# Altium footprint library WR-FPC_0.50mm.PcbLib: 147 footprints (part 4 of 10)
Each footprint in its own frame and in the unit in brackets; x right, y up, seen from the top. Pads: shape width x height; smd on the part's side, far side on the other; paste and mask are expansions set on the pad; w line width, h text height; cw(c..) or ccw(c..) is an arc to the next point about the centre after c.
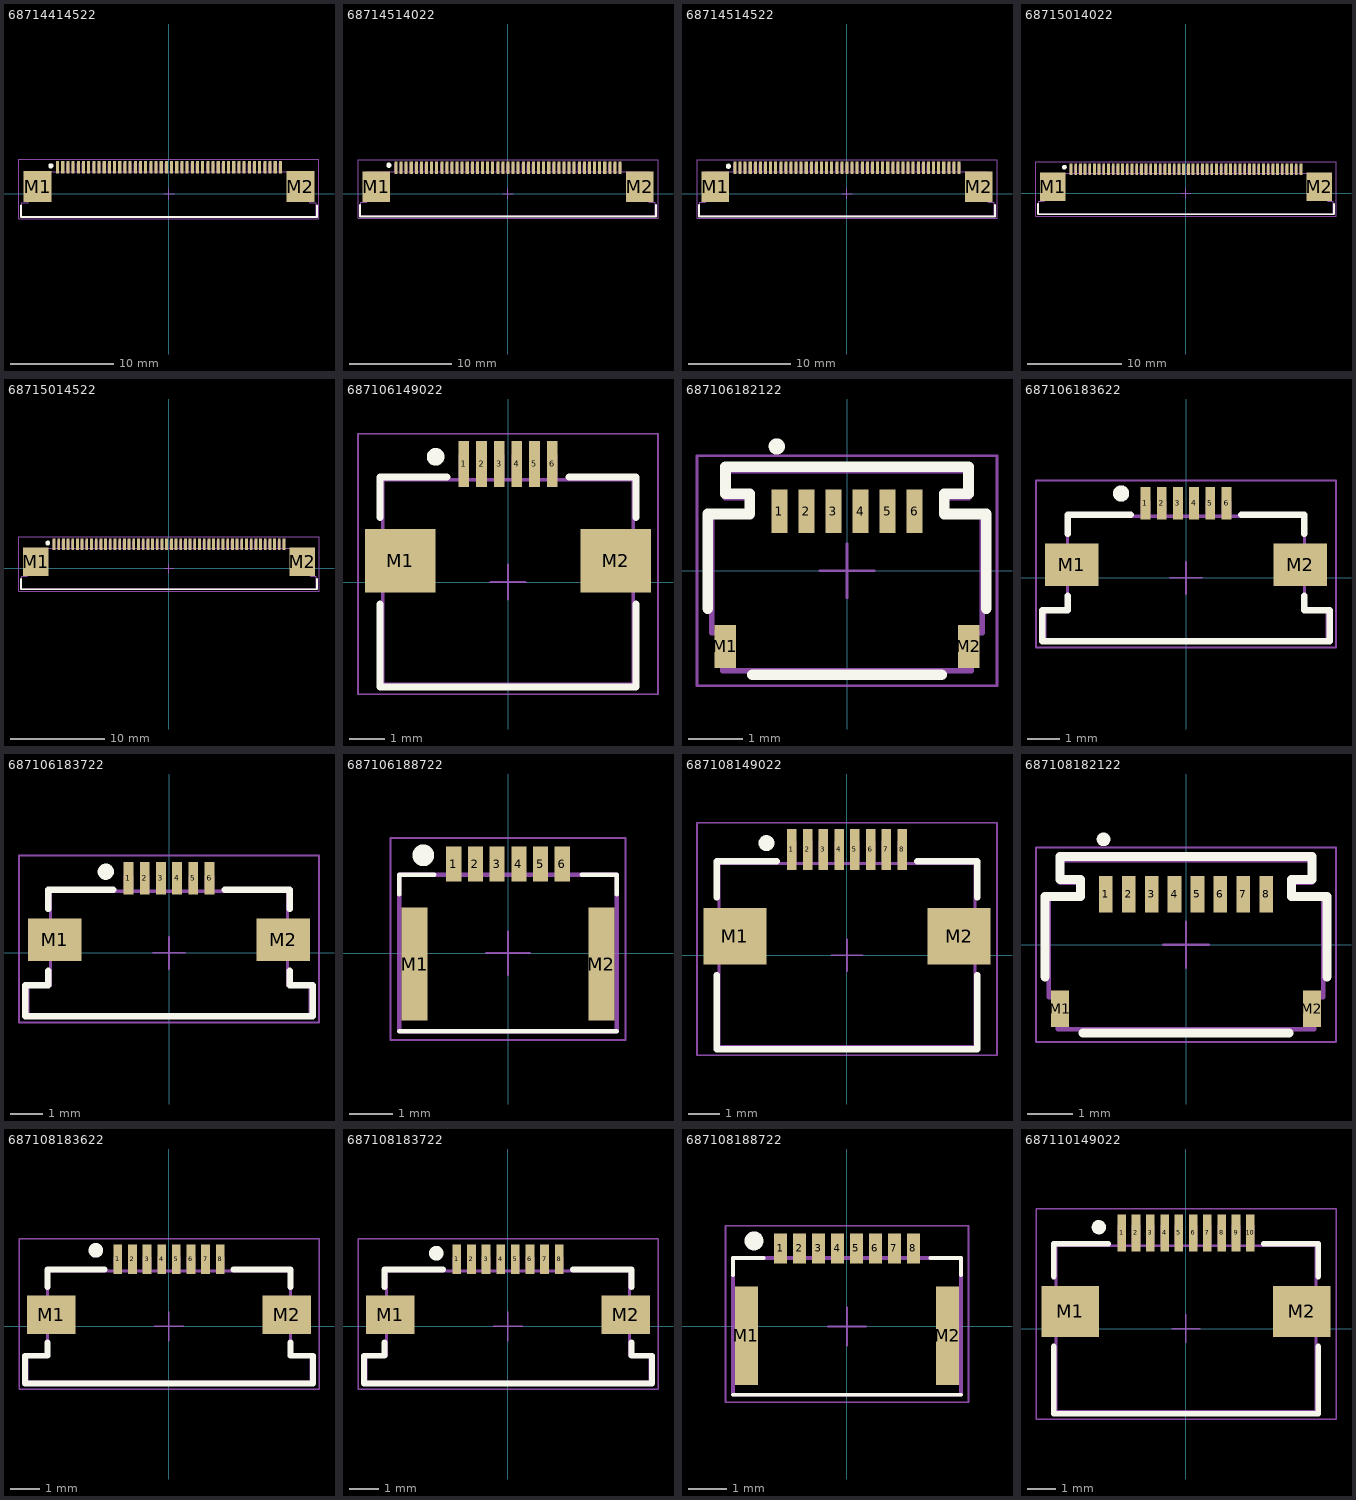
[diagram p3: the footprints below, top view; thin cyan lines are the x and y axes]

## 68714414522 [mm] "ZIF Connectors, Horizontal, Bottom Contact, pitch 0.5mm, 44p"
height 2.25
pads (46):
  rect 0.3x1.2 smd: 1(-10.75,2.56) 2(-10.25,2.56) 3(-9.75,2.56) 4(-9.25,2.56) 5(-8.75,2.56) 6(-8.25,2.56) 7(-7.75,2.56) 8(-7.25,2.56) 9(-6.75,2.56) 10(-6.25,2.56) 11(-5.75,2.56) 12(-5.25,2.56) 13(-4.75,2.56) 14(-4.25,2.56) 15(-3.75,2.56) 16(-3.25,2.56) 17(-2.75,2.56) 18(-2.25,2.56) 19(-1.75,2.56) 20(-1.25,2.56) 21(-0.75,2.56) 22(-0.25,2.56) 23(0.25,2.56) 24(0.75,2.56) 25(1.25,2.56) 26(1.75,2.56) 27(2.25,2.56) 28(2.75,2.56) 29(3.25,2.56) 30(3.75,2.56) 31(4.25,2.56) 32(4.75,2.56) 33(5.25,2.56) 34(5.75,2.56) 35(6.25,2.56) 36(6.75,2.56) 37(7.25,2.56) 38(7.75,2.56) 39(8.25,2.56) 40(8.75,2.56) 41(9.25,2.56) 42(9.75,2.56) 43(10.25,2.56) 44(10.75,2.56)
  rect 2.7x3 smd: M1(-12.68,0.7) M2(12.68,0.7)
Top Overlay:
  circle w0.25: c-11.4,2.7 r0.125
  lines w0.2: -14.275,-1.125 -14.275,-2.225 14.275,-2.225 14.275,-1.125
Top Designator:
  text ".Designator" at -7.498,-0.5 h1.5
Top Component Outline:
  lines w0.1: -10.85,2.15 -10.85,2.95 -10.65,2.95 -10.65,2.15 ; -10.35,2.15 -10.35,2.95 -10.15,2.95 -10.15,2.15 ; -9.85,2.15 -9.85,2.95 -9.65,2.95 -9.65,2.15 ; -9.35,2.15 -9.35,2.95 -9.15,2.95 -9.15,2.15 ; -8.85,2.15 -8.85,2.95 -8.65,2.95 -8.65,2.15 ; -8.35,2.15 -8.35,2.95 -8.15,2.95 -8.15,2.15 ; -7.85,2.15 -7.85,2.95 -7.65,2.95 -7.65,2.15 ; -7.35,2.15 -7.35,2.95 -7.15,2.95 -7.15,2.15 ; -6.85,2.15 -6.85,2.95 -6.65,2.95 -6.65,2.15 ; -6.35,2.15 -6.35,2.95 -6.15,2.95 -6.15,2.15 ; -5.85,2.15 -5.85,2.95 -5.65,2.95 -5.65,2.15 ; -5.35,2.15 -5.35,2.95 -5.15,2.95 -5.15,2.15 ; -4.85,2.15 -4.85,2.95 -4.65,2.95 -4.65,2.15 ; -4.35,2.15 -4.35,2.95 -4.15,2.95 -4.15,2.15 ; -3.85,2.15 -3.85,2.95 -3.65,2.95 -3.65,2.15 ; -3.35,2.15 -3.35,2.95 -3.15,2.95 -3.15,2.15 ; -2.85,2.15 -2.85,2.95 -2.65,2.95 -2.65,2.15 ; -2.35,2.15 -2.35,2.95 -2.15,2.95 -2.15,2.15 ; -1.85,2.15 -1.85,2.95 -1.65,2.95 -1.65,2.15 ; -1.35,2.15 -1.35,2.95 -1.15,2.95 -1.15,2.15 ; -0.85,2.15 -0.85,2.95 -0.65,2.95 -0.65,2.15 ; -0.35,2.15 -0.35,2.95 -0.15,2.95 -0.15,2.15 ; 0.15,2.15 0.15,2.95 0.35,2.95 0.35,2.15 ; 0.65,2.15 0.65,2.95 0.85,2.95 0.85,2.15 ; 1.15,2.15 1.15,2.95 1.35,2.95 1.35,2.15 ; 1.65,2.15 1.65,2.95 1.85,2.95 1.85,2.15 ; 2.15,2.15 2.15,2.95 2.35,2.95 2.35,2.15 ; 2.65,2.15 2.65,2.95 2.85,2.95 2.85,2.15 ; 3.15,2.15 3.15,2.95 3.35,2.95 3.35,2.15 ; 3.65,2.15 3.65,2.95 3.85,2.95 3.85,2.15 ; 4.15,2.15 4.15,2.95 4.35,2.95 4.35,2.15 ; 4.65,2.15 4.65,2.95 4.85,2.95 4.85,2.15 ; 5.15,2.15 5.15,2.95 5.35,2.95 5.35,2.15 ; 5.65,2.15 5.65,2.95 5.85,2.95 5.85,2.15 ; 6.15,2.15 6.15,2.95 6.35,2.95 6.35,2.15 ; 6.65,2.15 6.65,2.95 6.85,2.95 6.85,2.15 ; 7.15,2.15 7.15,2.95 7.35,2.95 7.35,2.15 ; 7.65,2.15 7.65,2.95 7.85,2.95 7.85,2.15 ; 8.15,2.15 8.15,2.95 8.35,2.95 8.35,2.15 ; 8.65,2.15 8.65,2.95 8.85,2.95 8.85,2.15 ; 9.15,2.15 9.15,2.95 9.35,2.95 9.35,2.15 ; 9.65,2.15 9.65,2.95 9.85,2.95 9.85,2.15 ; 10.15,2.15 10.15,2.95 10.35,2.95 10.35,2.15 ; 10.65,2.15 10.65,2.95 10.85,2.95 10.85,2.15 ; -14.2,-2.15 14.2,-2.15 14.2,-0.85 13.6,-0.85 13.6,2.15 -13.6,2.15 -13.6,-0.85 -14.2,-0.85 -14.2,-2.15
Top 3D Body:
  lines w0.1: -10.85,2.15 -10.85,2.95 -10.65,2.95 -10.65,2.15 ; -10.35,2.15 -10.35,2.95 -10.15,2.95 -10.15,2.15 ; -9.85,2.15 -9.85,2.95 -9.65,2.95 -9.65,2.15 ; -9.35,2.15 -9.35,2.95 -9.15,2.95 -9.15,2.15 ; -8.85,2.15 -8.85,2.95 -8.65,2.95 -8.65,2.15 ; -8.35,2.15 -8.35,2.95 -8.15,2.95 -8.15,2.15 ; -7.85,2.15 -7.85,2.95 -7.65,2.95 -7.65,2.15 ; -7.35,2.15 -7.35,2.95 -7.15,2.95 -7.15,2.15 ; -6.85,2.15 -6.85,2.95 -6.65,2.95 -6.65,2.15 ; -6.35,2.15 -6.35,2.95 -6.15,2.95 -6.15,2.15 ; -5.85,2.15 -5.85,2.95 -5.65,2.95 -5.65,2.15 ; -5.35,2.15 -5.35,2.95 -5.15,2.95 -5.15,2.15 ; -4.85,2.15 -4.85,2.95 -4.65,2.95 -4.65,2.15 ; -4.35,2.15 -4.35,2.95 -4.15,2.95 -4.15,2.15 ; -3.85,2.15 -3.85,2.95 -3.65,2.95 -3.65,2.15 ; -3.35,2.15 -3.35,2.95 -3.15,2.95 -3.15,2.15 ; -2.85,2.15 -2.85,2.95 -2.65,2.95 -2.65,2.15 ; -2.35,2.15 -2.35,2.95 -2.15,2.95 -2.15,2.15 ; -1.85,2.15 -1.85,2.95 -1.65,2.95 -1.65,2.15 ; -1.35,2.15 -1.35,2.95 -1.15,2.95 -1.15,2.15 ; -0.85,2.15 -0.85,2.95 -0.65,2.95 -0.65,2.15 ; -0.35,2.15 -0.35,2.95 -0.15,2.95 -0.15,2.15 ; 0.15,2.15 0.15,2.95 0.35,2.95 0.35,2.15 ; 0.65,2.15 0.65,2.95 0.85,2.95 0.85,2.15 ; 1.15,2.15 1.15,2.95 1.35,2.95 1.35,2.15 ; 1.65,2.15 1.65,2.95 1.85,2.95 1.85,2.15 ; 2.15,2.15 2.15,2.95 2.35,2.95 2.35,2.15 ; 2.65,2.15 2.65,2.95 2.85,2.95 2.85,2.15 ; 3.15,2.15 3.15,2.95 3.35,2.95 3.35,2.15 ; 3.65,2.15 3.65,2.95 3.85,2.95 3.85,2.15 ; 4.15,2.15 4.15,2.95 4.35,2.95 4.35,2.15 ; 4.65,2.15 4.65,2.95 4.85,2.95 4.85,2.15 ; 5.15,2.15 5.15,2.95 5.35,2.95 5.35,2.15 ; 5.65,2.15 5.65,2.95 5.85,2.95 5.85,2.15 ; 6.15,2.15 6.15,2.95 6.35,2.95 6.35,2.15 ; 6.65,2.15 6.65,2.95 6.85,2.95 6.85,2.15 ; 7.15,2.15 7.15,2.95 7.35,2.95 7.35,2.15 ; 7.65,2.15 7.65,2.95 7.85,2.95 7.85,2.15 ; 8.15,2.15 8.15,2.95 8.35,2.95 8.35,2.15 ; 8.65,2.15 8.65,2.95 8.85,2.95 8.85,2.15 ; 9.15,2.15 9.15,2.95 9.35,2.95 9.35,2.15 ; 9.65,2.15 9.65,2.95 9.85,2.95 9.85,2.15 ; 10.15,2.15 10.15,2.95 10.35,2.95 10.35,2.15 ; 10.65,2.15 10.65,2.95 10.85,2.95 10.85,2.15 ; -14.2,-2.15 -14.2,-0.85 -13.6,-0.85 -13.6,2.15 13.6,2.15 13.6,-0.85 14.2,-0.85 14.2,-2.15 -14.2,-2.15
Top Courtyard:
  lines w0.05: -0.5,0 0.5,0 ; 0,-0.5 0,0.5 ; -14.475,-2.425 -14.475,3.36 14.475,3.36 14.475,-2.425 -14.475,-2.425
3D body "68714414522.stp": height 2.1, standoff 0, extent -14.2,-2.15 14.2,2.95

## 68714514022 [mm] "ZIF Connectors, Horizontal, Top Contact, pitch 0.5mm, 45p"
height 2.25
pads (47):
  rect 0.3x1.2 smd: 1(-11,2.56) 2(-10.5,2.56) 3(-10,2.56) 4(-9.5,2.56) 5(-9,2.56) 6(-8.5,2.56) 7(-8,2.56) 8(-7.5,2.56) 9(-7,2.56) 10(-6.5,2.56) 11(-6,2.56) 12(-5.5,2.56) 13(-5,2.56) 14(-4.5,2.56) 15(-4,2.56) 16(-3.5,2.56) 17(-3,2.56) 18(-2.5,2.56) 19(-2,2.56) 20(-1.5,2.56) 21(-1,2.56) 22(-0.5,2.56) 23(0,2.56) 24(0.5,2.56) 25(1,2.56) 26(1.5,2.56) 27(2,2.56) 28(2.5,2.56) 29(3,2.56) 30(3.5,2.56) 31(4,2.56) 32(4.5,2.56) 33(5,2.56) 34(5.5,2.56) 35(6,2.56) 36(6.5,2.56) 37(7,2.56) 38(7.5,2.56) 39(8,2.56) 40(8.5,2.56) 41(9,2.56) 42(9.5,2.56) 43(10,2.56) 44(10.5,2.56) 45(11,2.56)
  rect 2.7x3 smd: M1(-12.93,0.7) M2(12.93,0.7)
Top Overlay:
  circle w0.25: c-11.7,2.8 r0.125
  lines w0.2: -14.525,-1.1 -14.525,-2.225 14.525,-2.225 14.525,-1.1
Top Designator:
  text ".Designator" at -7.498,-0.5 h1.5
Top Component Outline:
  lines w0.1: -11.1,2.15 -11.1,2.95 -10.9,2.95 -10.9,2.15 ; -10.6,2.15 -10.6,2.95 -10.4,2.95 -10.4,2.15 ; -10.1,2.15 -10.1,2.95 -9.9,2.95 -9.9,2.15 ; -9.6,2.15 -9.6,2.95 -9.4,2.95 -9.4,2.15 ; -9.1,2.15 -9.1,2.95 -8.9,2.95 -8.9,2.15 ; -8.6,2.15 -8.6,2.95 -8.4,2.95 -8.4,2.15 ; -8.1,2.15 -8.1,2.95 -7.9,2.95 -7.9,2.15 ; -7.6,2.15 -7.6,2.95 -7.4,2.95 -7.4,2.15 ; -7.1,2.15 -7.1,2.95 -6.9,2.95 -6.9,2.15 ; -6.6,2.15 -6.6,2.95 -6.4,2.95 -6.4,2.15 ; -6.1,2.15 -6.1,2.95 -5.9,2.95 -5.9,2.15 ; -5.6,2.15 -5.6,2.95 -5.4,2.95 -5.4,2.15 ; -5.1,2.15 -5.1,2.95 -4.9,2.95 -4.9,2.15 ; -4.6,2.15 -4.6,2.95 -4.4,2.95 -4.4,2.15 ; -4.1,2.15 -4.1,2.95 -3.9,2.95 -3.9,2.15 ; -3.6,2.15 -3.6,2.95 -3.4,2.95 -3.4,2.15 ; -3.1,2.15 -3.1,2.95 -2.9,2.95 -2.9,2.15 ; -2.6,2.15 -2.6,2.95 -2.4,2.95 -2.4,2.15 ; -2.1,2.15 -2.1,2.95 -1.9,2.95 -1.9,2.15 ; -1.6,2.15 -1.6,2.95 -1.4,2.95 -1.4,2.15 ; -1.1,2.15 -1.1,2.95 -0.9,2.95 -0.9,2.15 ; -0.6,2.15 -0.6,2.95 -0.4,2.95 -0.4,2.15 ; -0.1,2.15 -0.1,2.95 0.1,2.95 0.1,2.15 ; 0.4,2.15 0.4,2.95 0.6,2.95 0.6,2.15 ; 0.9,2.15 0.9,2.95 1.1,2.95 1.1,2.15 ; 1.4,2.15 1.4,2.95 1.6,2.95 1.6,2.15 ; 1.9,2.15 1.9,2.95 2.1,2.95 2.1,2.15 ; 2.4,2.15 2.4,2.95 2.6,2.95 2.6,2.15 ; 2.9,2.15 2.9,2.95 3.1,2.95 3.1,2.15 ; 3.4,2.15 3.4,2.95 3.6,2.95 3.6,2.15 ; 3.9,2.15 3.9,2.95 4.1,2.95 4.1,2.15 ; 4.4,2.15 4.4,2.95 4.6,2.95 4.6,2.15 ; 4.9,2.15 4.9,2.95 5.1,2.95 5.1,2.15 ; 5.4,2.15 5.4,2.95 5.6,2.95 5.6,2.15 ; 5.9,2.15 5.9,2.95 6.1,2.95 6.1,2.15 ; 6.4,2.15 6.4,2.95 6.6,2.95 6.6,2.15 ; 6.9,2.15 6.9,2.95 7.1,2.95 7.1,2.15 ; 7.4,2.15 7.4,2.95 7.6,2.95 7.6,2.15 ; 7.9,2.15 7.9,2.95 8.1,2.95 8.1,2.15 ; 8.4,2.15 8.4,2.95 8.6,2.95 8.6,2.15 ; 8.9,2.15 8.9,2.95 9.1,2.95 9.1,2.15 ; 9.4,2.15 9.4,2.95 9.6,2.95 9.6,2.15 ; 9.9,2.15 9.9,2.95 10.1,2.95 10.1,2.15 ; 10.4,2.15 10.4,2.95 10.6,2.95 10.6,2.15 ; 10.9,2.15 10.9,2.95 11.1,2.95 11.1,2.15 ; -14.45,-2.15 -14.45,-0.85 -13.85,-0.85 -13.85,2.15 13.85,2.15 13.85,-0.85 14.45,-0.85 14.45,-2.15 -14.45,-2.15
Top 3D Body:
  lines w0.1: -11.1,2.15 -11.1,2.95 -10.9,2.95 -10.9,2.15 ; -10.6,2.15 -10.6,2.95 -10.4,2.95 -10.4,2.15 ; -10.1,2.15 -10.1,2.95 -9.9,2.95 -9.9,2.15 ; -9.6,2.15 -9.6,2.95 -9.4,2.95 -9.4,2.15 ; -9.1,2.15 -9.1,2.95 -8.9,2.95 -8.9,2.15 ; -8.6,2.15 -8.6,2.95 -8.4,2.95 -8.4,2.15 ; -8.1,2.15 -8.1,2.95 -7.9,2.95 -7.9,2.15 ; -7.6,2.15 -7.6,2.95 -7.4,2.95 -7.4,2.15 ; -7.1,2.15 -7.1,2.95 -6.9,2.95 -6.9,2.15 ; -6.6,2.15 -6.6,2.95 -6.4,2.95 -6.4,2.15 ; -6.1,2.15 -6.1,2.95 -5.9,2.95 -5.9,2.15 ; -5.6,2.15 -5.6,2.95 -5.4,2.95 -5.4,2.15 ; -5.1,2.15 -5.1,2.95 -4.9,2.95 -4.9,2.15 ; -4.6,2.15 -4.6,2.95 -4.4,2.95 -4.4,2.15 ; -4.1,2.15 -4.1,2.95 -3.9,2.95 -3.9,2.15 ; -3.6,2.15 -3.6,2.95 -3.4,2.95 -3.4,2.15 ; -3.1,2.15 -3.1,2.95 -2.9,2.95 -2.9,2.15 ; -2.6,2.15 -2.6,2.95 -2.4,2.95 -2.4,2.15 ; -2.1,2.15 -2.1,2.95 -1.9,2.95 -1.9,2.15 ; -1.6,2.15 -1.6,2.95 -1.4,2.95 -1.4,2.15 ; -1.1,2.15 -1.1,2.95 -0.9,2.95 -0.9,2.15 ; -0.6,2.15 -0.6,2.95 -0.4,2.95 -0.4,2.15 ; -0.1,2.15 -0.1,2.95 0.1,2.95 0.1,2.15 ; 0.4,2.15 0.4,2.95 0.6,2.95 0.6,2.15 ; 0.9,2.15 0.9,2.95 1.1,2.95 1.1,2.15 ; 1.4,2.15 1.4,2.95 1.6,2.95 1.6,2.15 ; 1.9,2.15 1.9,2.95 2.1,2.95 2.1,2.15 ; 2.4,2.15 2.4,2.95 2.6,2.95 2.6,2.15 ; 2.9,2.15 2.9,2.95 3.1,2.95 3.1,2.15 ; 3.4,2.15 3.4,2.95 3.6,2.95 3.6,2.15 ; 3.9,2.15 3.9,2.95 4.1,2.95 4.1,2.15 ; 4.4,2.15 4.4,2.95 4.6,2.95 4.6,2.15 ; 4.9,2.15 4.9,2.95 5.1,2.95 5.1,2.15 ; 5.4,2.15 5.4,2.95 5.6,2.95 5.6,2.15 ; 5.9,2.15 5.9,2.95 6.1,2.95 6.1,2.15 ; 6.4,2.15 6.4,2.95 6.6,2.95 6.6,2.15 ; 6.9,2.15 6.9,2.95 7.1,2.95 7.1,2.15 ; 7.4,2.15 7.4,2.95 7.6,2.95 7.6,2.15 ; 7.9,2.15 7.9,2.95 8.1,2.95 8.1,2.15 ; 8.4,2.15 8.4,2.95 8.6,2.95 8.6,2.15 ; 8.9,2.15 8.9,2.95 9.1,2.95 9.1,2.15 ; 9.4,2.15 9.4,2.95 9.6,2.95 9.6,2.15 ; 9.9,2.15 9.9,2.95 10.1,2.95 10.1,2.15 ; 10.4,2.15 10.4,2.95 10.6,2.95 10.6,2.15 ; 10.9,2.15 10.9,2.95 11.1,2.95 11.1,2.15 ; -14.45,-2.15 14.45,-2.15 14.45,-0.85 13.85,-0.85 13.85,2.15 -13.85,2.15 -13.85,-0.85 -14.45,-0.85 -14.45,-2.15
Top Courtyard:
  lines w0.05: -0.5,0 0.5,0 ; 0,-0.5 0,0.5 ; -14.725,-2.425 -14.725,3.36 14.725,3.36 14.725,-2.425 -14.725,-2.425
3D body "68714514022.stp": height 2.1, standoff 0, extent -14.45,-2.15 14.45,2.95

## 68714514522 [mm] "ZIF Connectors, Horizontal, Bottom Contact, pitch 0.5mm, 45p"
height 2.25
pads (47):
  rect 0.3x1.2 smd: 1(-11,2.56) 2(-10.5,2.56) 3(-10,2.56) 4(-9.5,2.56) 5(-9,2.56) 6(-8.5,2.56) 7(-8,2.56) 8(-7.5,2.56) 9(-7,2.56) 10(-6.5,2.56) 11(-6,2.56) 12(-5.5,2.56) 13(-5,2.56) 14(-4.5,2.56) 15(-4,2.56) 16(-3.5,2.56) 17(-3,2.56) 18(-2.5,2.56) 19(-2,2.56) 20(-1.5,2.56) 21(-1,2.56) 22(-0.5,2.56) 23(0,2.56) 24(0.5,2.56) 25(1,2.56) 26(1.5,2.56) 27(2,2.56) 28(2.5,2.56) 29(3,2.56) 30(3.5,2.56) 31(4,2.56) 32(4.5,2.56) 33(5,2.56) 34(5.5,2.56) 35(6,2.56) 36(6.5,2.56) 37(7,2.56) 38(7.5,2.56) 39(8,2.56) 40(8.5,2.56) 41(9,2.56) 42(9.5,2.56) 43(10,2.56) 44(10.5,2.56) 45(11,2.56)
  rect 2.7x3 smd: M1(-12.93,0.7) M2(12.93,0.7)
Top Overlay:
  circle w0.25: c-11.65,2.7 r0.125
  lines w0.2: -14.525,-1.125 -14.525,-2.225 14.525,-2.225 14.525,-1.125
Top Designator:
  text ".Designator" at -7.498,-0.5 h1.5
Top Component Outline:
  lines w0.1: -11.1,2.15 -11.1,2.95 -10.9,2.95 -10.9,2.15 ; -10.6,2.15 -10.6,2.95 -10.4,2.95 -10.4,2.15 ; -10.1,2.15 -10.1,2.95 -9.9,2.95 -9.9,2.15 ; -9.6,2.15 -9.6,2.95 -9.4,2.95 -9.4,2.15 ; -9.1,2.15 -9.1,2.95 -8.9,2.95 -8.9,2.15 ; -8.6,2.15 -8.6,2.95 -8.4,2.95 -8.4,2.15 ; -8.1,2.15 -8.1,2.95 -7.9,2.95 -7.9,2.15 ; -7.6,2.15 -7.6,2.95 -7.4,2.95 -7.4,2.15 ; -7.1,2.15 -7.1,2.95 -6.9,2.95 -6.9,2.15 ; -6.6,2.15 -6.6,2.95 -6.4,2.95 -6.4,2.15 ; -6.1,2.15 -6.1,2.95 -5.9,2.95 -5.9,2.15 ; -5.6,2.15 -5.6,2.95 -5.4,2.95 -5.4,2.15 ; -5.1,2.15 -5.1,2.95 -4.9,2.95 -4.9,2.15 ; -4.6,2.15 -4.6,2.95 -4.4,2.95 -4.4,2.15 ; -4.1,2.15 -4.1,2.95 -3.9,2.95 -3.9,2.15 ; -3.6,2.15 -3.6,2.95 -3.4,2.95 -3.4,2.15 ; -3.1,2.15 -3.1,2.95 -2.9,2.95 -2.9,2.15 ; -2.6,2.15 -2.6,2.95 -2.4,2.95 -2.4,2.15 ; -2.1,2.15 -2.1,2.95 -1.9,2.95 -1.9,2.15 ; -1.6,2.15 -1.6,2.95 -1.4,2.95 -1.4,2.15 ; -1.1,2.15 -1.1,2.95 -0.9,2.95 -0.9,2.15 ; -0.6,2.15 -0.6,2.95 -0.4,2.95 -0.4,2.15 ; -0.1,2.15 -0.1,2.95 0.1,2.95 0.1,2.15 ; 0.4,2.15 0.4,2.95 0.6,2.95 0.6,2.15 ; 0.9,2.15 0.9,2.95 1.1,2.95 1.1,2.15 ; 1.4,2.15 1.4,2.95 1.6,2.95 1.6,2.15 ; 1.9,2.15 1.9,2.95 2.1,2.95 2.1,2.15 ; 2.4,2.15 2.4,2.95 2.6,2.95 2.6,2.15 ; 2.9,2.15 2.9,2.95 3.1,2.95 3.1,2.15 ; 3.4,2.15 3.4,2.95 3.6,2.95 3.6,2.15 ; 3.9,2.15 3.9,2.95 4.1,2.95 4.1,2.15 ; 4.4,2.15 4.4,2.95 4.6,2.95 4.6,2.15 ; 4.9,2.15 4.9,2.95 5.1,2.95 5.1,2.15 ; 5.4,2.15 5.4,2.95 5.6,2.95 5.6,2.15 ; 5.9,2.15 5.9,2.95 6.1,2.95 6.1,2.15 ; 6.4,2.15 6.4,2.95 6.6,2.95 6.6,2.15 ; 6.9,2.15 6.9,2.95 7.1,2.95 7.1,2.15 ; 7.4,2.15 7.4,2.95 7.6,2.95 7.6,2.15 ; 7.9,2.15 7.9,2.95 8.1,2.95 8.1,2.15 ; 8.4,2.15 8.4,2.95 8.6,2.95 8.6,2.15 ; 8.9,2.15 8.9,2.95 9.1,2.95 9.1,2.15 ; 9.4,2.15 9.4,2.95 9.6,2.95 9.6,2.15 ; 9.9,2.15 9.9,2.95 10.1,2.95 10.1,2.15 ; 10.4,2.15 10.4,2.95 10.6,2.95 10.6,2.15 ; 10.9,2.15 10.9,2.95 11.1,2.95 11.1,2.15 ; -14.45,-2.15 -14.45,-0.85 -13.85,-0.85 -13.85,2.15 13.85,2.15 13.85,-0.85 14.45,-0.85 14.45,-2.15 -14.45,-2.15
Top 3D Body:
  lines w0.1: -11.1,2.15 -11.1,2.95 -10.9,2.95 -10.9,2.15 ; -10.6,2.15 -10.6,2.95 -10.4,2.95 -10.4,2.15 ; -10.1,2.15 -10.1,2.95 -9.9,2.95 -9.9,2.15 ; -9.6,2.15 -9.6,2.95 -9.4,2.95 -9.4,2.15 ; -9.1,2.15 -9.1,2.95 -8.9,2.95 -8.9,2.15 ; -8.6,2.15 -8.6,2.95 -8.4,2.95 -8.4,2.15 ; -8.1,2.15 -8.1,2.95 -7.9,2.95 -7.9,2.15 ; -7.6,2.15 -7.6,2.95 -7.4,2.95 -7.4,2.15 ; -7.1,2.15 -7.1,2.95 -6.9,2.95 -6.9,2.15 ; -6.6,2.15 -6.6,2.95 -6.4,2.95 -6.4,2.15 ; -6.1,2.15 -6.1,2.95 -5.9,2.95 -5.9,2.15 ; -5.6,2.15 -5.6,2.95 -5.4,2.95 -5.4,2.15 ; -5.1,2.15 -5.1,2.95 -4.9,2.95 -4.9,2.15 ; -4.6,2.15 -4.6,2.95 -4.4,2.95 -4.4,2.15 ; -4.1,2.15 -4.1,2.95 -3.9,2.95 -3.9,2.15 ; -3.6,2.15 -3.6,2.95 -3.4,2.95 -3.4,2.15 ; -3.1,2.15 -3.1,2.95 -2.9,2.95 -2.9,2.15 ; -2.6,2.15 -2.6,2.95 -2.4,2.95 -2.4,2.15 ; -2.1,2.15 -2.1,2.95 -1.9,2.95 -1.9,2.15 ; -1.6,2.15 -1.6,2.95 -1.4,2.95 -1.4,2.15 ; -1.1,2.15 -1.1,2.95 -0.9,2.95 -0.9,2.15 ; -0.6,2.15 -0.6,2.95 -0.4,2.95 -0.4,2.15 ; -0.1,2.15 -0.1,2.95 0.1,2.95 0.1,2.15 ; 0.4,2.15 0.4,2.95 0.6,2.95 0.6,2.15 ; 0.9,2.15 0.9,2.95 1.1,2.95 1.1,2.15 ; 1.4,2.15 1.4,2.95 1.6,2.95 1.6,2.15 ; 1.9,2.15 1.9,2.95 2.1,2.95 2.1,2.15 ; 2.4,2.15 2.4,2.95 2.6,2.95 2.6,2.15 ; 2.9,2.15 2.9,2.95 3.1,2.95 3.1,2.15 ; 3.4,2.15 3.4,2.95 3.6,2.95 3.6,2.15 ; 3.9,2.15 3.9,2.95 4.1,2.95 4.1,2.15 ; 4.4,2.15 4.4,2.95 4.6,2.95 4.6,2.15 ; 4.9,2.15 4.9,2.95 5.1,2.95 5.1,2.15 ; 5.4,2.15 5.4,2.95 5.6,2.95 5.6,2.15 ; 5.9,2.15 5.9,2.95 6.1,2.95 6.1,2.15 ; 6.4,2.15 6.4,2.95 6.6,2.95 6.6,2.15 ; 6.9,2.15 6.9,2.95 7.1,2.95 7.1,2.15 ; 7.4,2.15 7.4,2.95 7.6,2.95 7.6,2.15 ; 7.9,2.15 7.9,2.95 8.1,2.95 8.1,2.15 ; 8.4,2.15 8.4,2.95 8.6,2.95 8.6,2.15 ; 8.9,2.15 8.9,2.95 9.1,2.95 9.1,2.15 ; 9.4,2.15 9.4,2.95 9.6,2.95 9.6,2.15 ; 9.9,2.15 9.9,2.95 10.1,2.95 10.1,2.15 ; 10.4,2.15 10.4,2.95 10.6,2.95 10.6,2.15 ; 10.9,2.15 10.9,2.95 11.1,2.95 11.1,2.15 ; -14.45,-2.15 14.45,-2.15 14.45,-0.85 13.85,-0.85 13.85,2.15 -13.85,2.15 -13.85,-0.85 -14.45,-0.85 -14.45,-2.15
Top Courtyard:
  lines w0.05: -0.5,0 0.5,0 ; 0,-0.5 0,0.5 ; -14.725,-2.425 14.725,-2.425 14.725,3.36 -14.725,3.36 -14.725,-2.425
3D body "68714514522.stp": height 2.1, standoff 0, extent -14.45,-2.15 14.45,2.95

## 68715014022 [mm] "ZIF Connectors, Horizontal, Top Contact, pitch 0.5mm, 50p"
height 2.25
pads (52):
  rect 0.3x1.2 smd: 1(-12.25,2.56) 2(-11.75,2.56) 3(-11.25,2.56) 4(-10.75,2.56) 5(-10.25,2.56) 6(-9.75,2.56) 7(-9.25,2.56) 8(-8.75,2.56) 9(-8.25,2.56) 10(-7.75,2.56) 11(-7.25,2.56) 12(-6.75,2.56) 13(-6.25,2.56) 14(-5.75,2.56) 15(-5.25,2.56) 16(-4.75,2.56) 17(-4.25,2.56) 18(-3.75,2.56) 19(-3.25,2.56) 20(-2.75,2.56) 21(-2.25,2.56) 22(-1.75,2.56) 23(-1.25,2.56) 24(-0.75,2.56) 25(-0.25,2.56) 26(0.25,2.56) 27(0.75,2.56) 28(1.25,2.56) 29(1.75,2.56) 30(2.25,2.56) 31(2.75,2.56) 32(3.25,2.56) 33(3.75,2.56) 34(4.25,2.56) 35(4.75,2.56) 36(5.25,2.56) 37(5.75,2.56) 38(6.25,2.56) 39(6.75,2.56) 40(7.25,2.56) 41(7.75,2.56) 42(8.25,2.56) 43(8.75,2.56) 44(9.25,2.56) 45(9.75,2.56) 46(10.25,2.56) 47(10.75,2.56) 48(11.25,2.56) 49(11.75,2.56) 50(12.25,2.56)
  rect 2.7x3 smd: M1(-14.18,0.7) M2(14.18,0.7)
Top Overlay:
  circle w0.25: c-12.95,2.8 r0.125
  lines w0.2: -15.775,-1.1 -15.775,-2.225 15.775,-2.225 15.775,-1.1
Top Designator:
  text ".Designator" at -7.498,-0.5 h1.5
Top Component Outline:
  drawing of 158 lines, arcs and shapes, not listed
Top 3D Body:
  drawing of 158 lines, arcs and shapes, not listed
Top Courtyard:
  lines w0.05: -0.5,0 0.5,0 ; 0,-0.5 0,0.5 ; -15.975,-2.425 15.975,-2.425 15.975,3.36 -15.975,3.36 -15.975,-2.425
3D body "68715014022.stp": height 2.1, standoff 0, extent -15.7,-2.15 15.7,2.95

## 68715014522 [mm] "ZIF Connectors, Horizontal, Bottom Contact, pitch 0.5mm, 50p"
height 2.25
pads (52):
  rect 0.3x1.2 smd: 1(-12.25,2.56) 2(-11.75,2.56) 3(-11.25,2.56) 4(-10.75,2.56) 5(-10.25,2.56) 6(-9.75,2.56) 7(-9.25,2.56) 8(-8.75,2.56) 9(-8.25,2.56) 10(-7.75,2.56) 11(-7.25,2.56) 12(-6.75,2.56) 13(-6.25,2.56) 14(-5.75,2.56) 15(-5.25,2.56) 16(-4.75,2.56) 17(-4.25,2.56) 18(-3.75,2.56) 19(-3.25,2.56) 20(-2.75,2.56) 21(-2.25,2.56) 22(-1.75,2.56) 23(-1.25,2.56) 24(-0.75,2.56) 25(-0.25,2.56) 26(0.25,2.56) 27(0.75,2.56) 28(1.25,2.56) 29(1.75,2.56) 30(2.25,2.56) 31(2.75,2.56) 32(3.25,2.56) 33(3.75,2.56) 34(4.25,2.56) 35(4.75,2.56) 36(5.25,2.56) 37(5.75,2.56) 38(6.25,2.56) 39(6.75,2.56) 40(7.25,2.56) 41(7.75,2.56) 42(8.25,2.56) 43(8.75,2.56) 44(9.25,2.56) 45(9.75,2.56) 46(10.25,2.56) 47(10.75,2.56) 48(11.25,2.56) 49(11.75,2.56) 50(12.25,2.56)
  rect 2.7x3 smd: M1(-14.18,0.7) M2(14.18,0.7)
Top Overlay:
  circle w0.25: c-12.9,2.7 r0.125
  lines w0.2: -15.775,-1.125 -15.775,-2.225 15.775,-2.225 15.775,-1.125
Top Designator:
  text ".Designator" at -7.498,-0.5 h1.5
Top Component Outline:
  drawing of 158 lines, arcs and shapes, not listed
Top 3D Body:
  drawing of 158 lines, arcs and shapes, not listed
Top Courtyard:
  lines w0.05: -0.5,0 0.5,0 ; 0,-0.5 0,0.5 ; -15.975,-2.425 -15.975,3.36 15.975,3.36 15.975,-2.425 -15.975,-2.425
3D body "68715014522.stp": height 2.1, standoff 0, extent -15.7,-2.15 15.7,2.95

## 687106149022 [mm] "0.50mm SMT ZIF Horizontal Hinge Type Bottom Contact, 6p"
height 2.3
pads (8):
  rect 0.3x1.3 smd: 1(-1.25,3.35) 2(-0.75,3.35) 3(-0.25,3.35) 4(0.25,3.35) 5(0.75,3.35) 6(1.25,3.35)
  rect 2x1.8 smd: M1(-3.05,0.6) M2(3.05,0.6)
Top Overlay:
  circle w0.25: c-2.05,3.55 r0.125
  lines w0.2: -3.625,-0.625 -3.625,-2.975 3.625,-2.975 3.625,-0.625 ; -3.625,1.825 -3.625,2.975 -1.725,2.975 ; 1.725,2.975 3.625,2.975 3.625,1.825
Top Designator:
  text ".Designator" at -7.498,-0.5 h1.5
Top Component Outline:
  lines w0.1: -1.35,2.9 -1.35,3.6 -1.15,3.6 -1.15,2.9 ; -0.85,2.9 -0.85,3.6 -0.65,3.6 -0.65,2.9 ; -0.35,2.9 -0.35,3.6 -0.15,3.6 -0.15,2.9 ; 0.15,2.9 0.15,3.6 0.35,3.6 0.35,2.9 ; 0.65,2.9 0.65,3.6 0.85,3.6 0.85,2.9 ; 1.15,2.9 1.15,3.6 1.35,3.6 1.35,2.9 ; -3.55,-2.9 -3.55,2.9 3.55,2.9 3.55,-2.9 -3.55,-2.9
Top 3D Body:
  lines w0.1: -1.35,2.9 -1.35,3.6 -1.15,3.6 -1.15,2.9 ; -0.85,2.9 -0.85,3.6 -0.65,3.6 -0.65,2.9 ; -0.35,2.9 -0.35,3.6 -0.15,3.6 -0.15,2.9 ; 0.15,2.9 0.15,3.6 0.35,3.6 0.35,2.9 ; 0.65,2.9 0.65,3.6 0.85,3.6 0.85,2.9 ; 1.15,2.9 1.15,3.6 1.35,3.6 1.35,2.9 ; -3.55,-2.9 3.55,-2.9 3.55,2.9 -3.55,2.9 -3.55,-2.9
Top Courtyard:
  lines w0.05: -0.5,0 0.5,0 ; 0,-0.5 0,0.5 ; -4.25,-3.175 -4.25,4.2 4.25,4.2 4.25,-3.175 -4.25,-3.175
3D body "687106149022.stp": height 2.25, standoff 0, extent -3.55,-2.9 3.55,3.6

## 687106182122 [mm] "ZIF Connectors, Horizontal, Dual Contact Back Locking, pitch 0.5mm, 6p"
height 1.06
pads (8):
  rect 0.3x0.8 smd: 1(-1.25,1.1) 2(-0.75,1.1) 3(-0.25,1.1) 4(0.25,1.1) 5(0.75,1.1) 6(1.25,1.1)
  rect 0.4x0.8 smd: M1(-2.25,-1.4) M2(2.25,-1.4)
Top Overlay:
  circle w0.15: c-1.3,2.3 r0.075
  lines w0.2: -2.575,-0.7 -2.575,1.05 -1.8,1.05 -1.8,1.425 -2.25,1.425 -2.25,1.925 2.25,1.925 2.25,1.425 1.8,1.425 1.8,1.05 2.575,1.05 2.575,-0.7 ; -1.75,-1.925 1.75,-1.925
Top Designator:
  text ".Designator" at -5.998,-0.4 h1.2
Top Component Outline:
  lines w0.1: -2.5,-1.15 -2.3,-1.15 -2.3,-1.85 2.3,-1.85 2.3,-1.15 2.5,-1.15 2.5,1.05 1.8,1.05 1.8,1.35 2.25,1.35 2.25,1.85 -2.25,1.85 -2.25,1.35 -1.8,1.35 -1.8,1.05 -2.5,1.05 -2.5,-1.15
Top 3D Body:
  lines w0.1: -2.5,-1.15 -2.5,1.05 -1.8,1.05 -1.8,1.35 -2.25,1.35 -2.25,1.85 2.25,1.85 2.25,1.35 1.8,1.35 1.8,1.05 2.5,1.05 2.5,-1.15 2.3,-1.15 2.3,-1.85 -2.3,-1.85 -2.3,-1.15 -2.5,-1.15
Top Courtyard:
  lines w0.05: -0.5,0 0.5,0 ; 0,-0.5 0,0.5 ; -2.775,-2.125 2.775,-2.125 2.775,2.125 -2.775,2.125 -2.775,-2.125
3D body "687106182122.stp": height 0.98, standoff -0.01, extent -2.5,-1.85 2.5,1.85

## 687106183622 [mm] "ZIF Connectors, Horizontal, Top Contact Low Profile, pitch 0.5mm, 6p"
height 1.3
pads (8):
  rect 0.3x1 smd: 1(-1.25,2.3) 2(-0.75,2.3) 3(-0.25,2.3) 4(0.25,2.3) 5(0.75,2.3) 6(1.25,2.3)
  rect 1.65x1.3 smd: M1(-3.525,0.4) M2(3.525,0.4)
Top Overlay:
  circle w0.25: c-2,2.6 r0.125
  lines w0.2: -3.65,-0.55 -3.65,-1 -4.425,-1 -4.425,-1.95 4.425,-1.95 4.425,-1 3.65,-1 3.65,-0.55 ; -3.65,1.35 -3.65,1.95 -1.7,1.95 ; 1.7,1.95 3.65,1.95 3.65,1.35
Top Designator:
  text ".Designator" at -7.498,-0.5 h1.5
Top Component Outline:
  lines w0.1: -1.35,1.9 -1.35,2.35 -1.15,2.35 -1.15,1.9 ; -0.85,1.9 -0.85,2.35 -0.65,2.35 -0.65,1.9 ; -0.35,1.9 -0.35,2.35 -0.15,2.35 -0.15,1.9 ; 0.15,1.9 0.15,2.35 0.35,2.35 0.35,1.9 ; 0.65,1.9 0.65,2.35 0.85,2.35 0.85,1.9 ; 1.15,1.9 1.15,2.35 1.35,2.35 1.35,1.9 ; -4.35,-1.9 -4.35,-1 -3.65,-1 -3.65,1.9 3.65,1.9 3.65,-1 4.35,-1 4.35,-1.9 -4.35,-1.9
Top 3D Body:
  lines w0.1: -1.35,1.9 -1.35,2.35 -1.15,2.35 -1.15,1.9 ; -0.85,1.9 -0.85,2.35 -0.65,2.35 -0.65,1.9 ; -0.35,1.9 -0.35,2.35 -0.15,2.35 -0.15,1.9 ; 0.15,1.9 0.15,2.35 0.35,2.35 0.35,1.9 ; 0.65,1.9 0.65,2.35 0.85,2.35 0.85,1.9 ; 1.15,1.9 1.15,2.35 1.35,2.35 1.35,1.9 ; -4.35,-1.9 4.35,-1.9 4.35,-1 3.65,-1 3.65,1.9 -3.65,1.9 -3.65,-1 -4.35,-1 -4.35,-1.9
Top Courtyard:
  lines w0.05: -0.5,0 0.5,0 ; 0,-0.5 0,0.5 ; -4.625,-2.15 -4.625,3 4.625,3 4.625,-2.15 -4.625,-2.15
3D body "687106183622.stp": height 1.28, standoff -0.01, extent -4.35,-1.9 4.35,2.35

## 687106183722 [mm] "ZIF Connectors, Horizontal, Bottom Contact Low Profile, pitch 0.5mm, 6p"
height 1.3
pads (8):
  rect 0.3x1 smd: 1(-1.25,2.3) 2(-0.75,2.3) 3(-0.25,2.3) 4(0.25,2.3) 5(0.75,2.3) 6(1.25,2.3)
  rect 1.65x1.3 smd: M1(-3.525,0.4) M2(3.525,0.4)
Top Overlay:
  circle w0.25: c-1.95,2.5 r0.125
  lines w0.2: -3.725,-0.55 -3.725,-1 -4.425,-1 -4.425,-1.95 4.425,-1.95 4.425,-1 3.725,-1 3.725,-0.55 ; -3.725,1.35 -3.725,1.95 -1.725,1.95 ; 1.725,1.95 3.725,1.95 3.725,1.35
Top Designator:
  text ".Designator" at -7.498,-0.5 h1.5
Top Component Outline:
  lines w0.1: -1.35,1.9 -1.35,2.35 -1.15,2.35 -1.15,1.9 ; -0.85,1.9 -0.85,2.35 -0.65,2.35 -0.65,1.9 ; -0.35,1.9 -0.35,2.35 -0.15,2.35 -0.15,1.9 ; 0.15,1.9 0.15,2.35 0.35,2.35 0.35,1.9 ; 0.65,1.9 0.65,2.35 0.85,2.35 0.85,1.9 ; 1.15,1.9 1.15,2.35 1.35,2.35 1.35,1.9 ; -4.35,-1.9 4.35,-1.9 4.35,-1 3.65,-1 3.65,1.9 -3.65,1.9 -3.65,-1 -4.35,-1 -4.35,-1.9
Top 3D Body:
  lines w0.1: -1.35,1.9 -1.35,2.35 -1.15,2.35 -1.15,1.9 ; -0.85,1.9 -0.85,2.35 -0.65,2.35 -0.65,1.9 ; -0.35,1.9 -0.35,2.35 -0.15,2.35 -0.15,1.9 ; 0.15,1.9 0.15,2.35 0.35,2.35 0.35,1.9 ; 0.65,1.9 0.65,2.35 0.85,2.35 0.85,1.9 ; 1.15,1.9 1.15,2.35 1.35,2.35 1.35,1.9 ; -4.35,-1.9 -4.35,-1 -3.65,-1 -3.65,1.9 3.65,1.9 3.65,-1 4.35,-1 4.35,-1.9 -4.35,-1.9
Top Courtyard:
  lines w0.05: -0.5,0 0.5,0 ; 0,-0.5 0,0.5 ; -4.625,-2.15 4.625,-2.15 4.625,3 -4.625,3 -4.625,-2.15
3D body "687106183722.stp": height 1.28, standoff -0.01, extent -4.35,-1.9 4.35,2.35

## 687106188722 [mm] "0.5 mm LIF Horizontal FFC Connector, 6pins"
height 1.2
pads (8):
  rect 0.35x0.8 smd: 1(-1.25,2.05) 2(-0.75,2.05) 3(-0.25,2.05) 4(0.25,2.05) 5(0.75,2.05) 6(1.25,2.05)
  rect 0.6x2.6 smd: M1(-2.15,-0.25) M2(2.15,-0.25)
Top Overlay:
  circle w0.25: c-1.95,2.25 r0.125
  lines w0.1: -2.5,-1.8 2.5,-1.8 ; -2.5,1.35 -2.5,1.8 -1.7,1.8 ; 1.7,1.8 2.5,1.8 2.5,1.35
Top Designator:
  text ".Designator" at -7.498,-0.5 h1.5
Top Component Outline:
  lines w0.1: -1.35,1.8 -1.35,2.3 -1.15,2.3 -1.15,1.8 ; -0.85,1.8 -0.85,2.3 -0.65,2.3 -0.65,1.8 ; -0.35,1.8 -0.35,2.3 -0.15,2.3 -0.15,1.8 ; 0.15,1.8 0.15,2.3 0.35,2.3 0.35,1.8 ; 0.65,1.8 0.65,2.3 0.85,2.3 0.85,1.8 ; 1.15,1.8 1.15,2.3 1.35,2.3 1.35,1.8 ; -2.5,-1.8 2.5,-1.8 2.5,1.8 -2.5,1.8 -2.5,-1.8
Top 3D Body:
  lines w0.1: -1.35,1.8 -1.35,2.3 -1.15,2.3 -1.15,1.8 ; -0.85,1.8 -0.85,2.3 -0.65,2.3 -0.65,1.8 ; -0.35,1.8 -0.35,2.3 -0.15,2.3 -0.15,1.8 ; 0.15,1.8 0.15,2.3 0.35,2.3 0.35,1.8 ; 0.65,1.8 0.65,2.3 0.85,2.3 0.85,1.8 ; 1.15,1.8 1.15,2.3 1.35,2.3 1.35,1.8 ; -2.5,-1.8 -2.5,1.8 2.5,1.8 2.5,-1.8 -2.5,-1.8
Top Courtyard:
  lines w0.05: -0.5,0 0.5,0 ; 0,-0.5 0,0.5 ; -2.7,-2 2.7,-2 2.7,2.65 -2.7,2.65 -2.7,-2
3D body "687106188722.stp": height 1.2, standoff 0, extent -2.5,-1.8 2.5,2.3

## 687108149022 [mm] "0.50mm SMT ZIF Horizontal Hinge Type Bottom Contact, 8p"
height 2.3
pads (10):
  rect 0.3x1.3 smd: 1(-1.75,3.35) 2(-1.25,3.35) 3(-0.75,3.35) 4(-0.25,3.35) 5(0.25,3.35) 6(0.75,3.35) 7(1.25,3.35) 8(1.75,3.35)
  rect 2x1.8 smd: M1(-3.55,0.6) M2(3.55,0.6)
Top Overlay:
  circle w0.25: c-2.55,3.55 r0.125
  lines w0.2: -4.125,-0.625 -4.125,-2.975 4.125,-2.975 4.125,-0.625 ; -4.125,1.825 -4.125,2.975 -2.225,2.975 ; 2.225,2.975 4.125,2.975 4.125,1.825
Top Designator:
  text ".Designator" at -7.498,-0.5 h1.5
Top Component Outline:
  lines w0.1: -1.85,2.9 -1.85,3.6 -1.65,3.6 -1.65,2.9 ; -1.35,2.9 -1.35,3.6 -1.15,3.6 -1.15,2.9 ; -0.85,2.9 -0.85,3.6 -0.65,3.6 -0.65,2.9 ; -0.35,2.9 -0.35,3.6 -0.15,3.6 -0.15,2.9 ; 0.15,2.9 0.15,3.6 0.35,3.6 0.35,2.9 ; 0.65,2.9 0.65,3.6 0.85,3.6 0.85,2.9 ; 1.15,2.9 1.15,3.6 1.35,3.6 1.35,2.9 ; 1.65,2.9 1.65,3.6 1.85,3.6 1.85,2.9 ; -4.05,-2.9 4.05,-2.9 4.05,2.9 -4.05,2.9 -4.05,-2.9
Top 3D Body:
  lines w0.1: -1.85,2.9 -1.85,3.6 -1.65,3.6 -1.65,2.9 ; -1.35,2.9 -1.35,3.6 -1.15,3.6 -1.15,2.9 ; -0.85,2.9 -0.85,3.6 -0.65,3.6 -0.65,2.9 ; -0.35,2.9 -0.35,3.6 -0.15,3.6 -0.15,2.9 ; 0.15,2.9 0.15,3.6 0.35,3.6 0.35,2.9 ; 0.65,2.9 0.65,3.6 0.85,3.6 0.85,2.9 ; 1.15,2.9 1.15,3.6 1.35,3.6 1.35,2.9 ; 1.65,2.9 1.65,3.6 1.85,3.6 1.85,2.9 ; -4.05,-2.9 -4.05,2.9 4.05,2.9 4.05,-2.9 -4.05,-2.9
Top Courtyard:
  lines w0.05: -0.5,0 0.5,0 ; 0,-0.5 0,0.5 ; -4.75,-3.175 4.75,-3.175 4.75,4.2 -4.75,4.2 -4.75,-3.175
3D body "687108149022.stp": height 2.25, standoff 0, extent -4.05,-2.9 4.05,3.6

## 687108182122 [mm] "ZIF Connectors, Horizontal, Dual Contact Back Locking, pitch 0.5mm, 8p"
height 1.06
pads (10):
  rect 0.3x0.8 smd: 1(-1.75,1.1) 2(-1.25,1.1) 3(-0.75,1.1) 4(-0.25,1.1) 5(0.25,1.1) 6(0.75,1.1) 7(1.25,1.1) 8(1.75,1.1)
  rect 0.4x0.8 smd: M1(-2.75,-1.4) M2(2.75,-1.4)
Top Overlay:
  circle w0.15: c-1.8,2.3 r0.075
  lines w0.2: -3.075,-0.7 -3.075,1.05 -2.3,1.05 -2.3,1.425 -2.75,1.425 -2.75,1.925 2.75,1.925 2.75,1.425 2.3,1.425 2.3,1.05 3.075,1.05 3.075,-0.7 ; -2.25,-1.925 2.25,-1.925
Top Designator:
  text ".Designator" at -7.498,-0.5 h1.5
Top Component Outline:
  lines w0.1: -3,-1.15 -2.8,-1.15 -2.8,-1.85 2.8,-1.85 2.8,-1.15 3,-1.15 3,1.05 2.3,1.05 2.3,1.35 2.75,1.35 2.75,1.85 -2.75,1.85 -2.75,1.35 -2.3,1.35 -2.3,1.05 -3,1.05 -3,-1.15
Top 3D Body:
  lines w0.1: -3,-1.15 -3,1.05 -2.3,1.05 -2.3,1.35 -2.75,1.35 -2.75,1.85 2.75,1.85 2.75,1.35 2.3,1.35 2.3,1.05 3,1.05 3,-1.15 2.8,-1.15 2.8,-1.85 -2.8,-1.85 -2.8,-1.15 -3,-1.15
Top Courtyard:
  lines w0.05: -0.5,0 0.5,0 ; 0,-0.5 0,0.5 ; -3.275,-2.125 3.275,-2.125 3.275,2.125 -3.275,2.125 -3.275,-2.125
3D body "687108182122.stp": height 0.98, standoff -0.01, extent -3,-1.85 3,1.85

## 687108183622 [mm] "ZIF Connectors, Horizontal, Top Contact Low Profile, pitch 0.5mm, 8p"
height 1.3
pads (10):
  rect 0.3x1 smd: 1(-1.75,2.3) 2(-1.25,2.3) 3(-0.75,2.3) 4(-0.25,2.3) 5(0.25,2.3) 6(0.75,2.3) 7(1.25,2.3) 8(1.75,2.3)
  rect 1.65x1.3 smd: M1(-4.025,0.4) M2(4.025,0.4)
Top Overlay:
  circle w0.25: c-2.5,2.6 r0.125
  lines w0.2: -4.15,-0.55 -4.15,-1 -4.925,-1 -4.925,-1.95 4.925,-1.95 4.925,-1 4.15,-1 4.15,-0.55 ; -4.15,1.35 -4.15,1.95 -2.2,1.95 ; 2.2,1.95 4.15,1.95 4.15,1.35
Top Designator:
  text ".Designator" at -7.498,-0.5 h1.5
Top Component Outline:
  lines w0.1: -1.85,1.9 -1.85,2.35 -1.65,2.35 -1.65,1.9 ; -1.35,1.9 -1.35,2.35 -1.15,2.35 -1.15,1.9 ; -0.85,1.9 -0.85,2.35 -0.65,2.35 -0.65,1.9 ; -0.35,1.9 -0.35,2.35 -0.15,2.35 -0.15,1.9 ; 0.15,1.9 0.15,2.35 0.35,2.35 0.35,1.9 ; 0.65,1.9 0.65,2.35 0.85,2.35 0.85,1.9 ; 1.15,1.9 1.15,2.35 1.35,2.35 1.35,1.9 ; 1.65,1.9 1.65,2.35 1.85,2.35 1.85,1.9 ; -4.85,-1.9 4.85,-1.9 4.85,-1 4.15,-1 4.15,1.9 -4.15,1.9 -4.15,-1 -4.85,-1 -4.85,-1.9
Top 3D Body:
  lines w0.1: -1.85,1.9 -1.85,2.35 -1.65,2.35 -1.65,1.9 ; -1.35,1.9 -1.35,2.35 -1.15,2.35 -1.15,1.9 ; -0.85,1.9 -0.85,2.35 -0.65,2.35 -0.65,1.9 ; -0.35,1.9 -0.35,2.35 -0.15,2.35 -0.15,1.9 ; 0.15,1.9 0.15,2.35 0.35,2.35 0.35,1.9 ; 0.65,1.9 0.65,2.35 0.85,2.35 0.85,1.9 ; 1.15,1.9 1.15,2.35 1.35,2.35 1.35,1.9 ; 1.65,1.9 1.65,2.35 1.85,2.35 1.85,1.9 ; -4.85,-1.9 -4.85,-1 -4.15,-1 -4.15,1.9 4.15,1.9 4.15,-1 4.85,-1 4.85,-1.9 -4.85,-1.9
Top Courtyard:
  lines w0.05: -0.5,0 0.5,0 ; 0,-0.5 0,0.5 ; -5.125,-2.15 5.125,-2.15 5.125,3 -5.125,3 -5.125,-2.15
3D body "687108183622.stp": height 1.28, standoff -0.01, extent -4.85,-1.9 4.85,2.35

## 687108183722 [mm] "ZIF Connectors, Horizontal, Bottom Contact Low Profile, pitch 0.5mm, 8p"
height 1.3
pads (10):
  rect 0.3x1 smd: 1(-1.75,2.3) 2(-1.25,2.3) 3(-0.75,2.3) 4(-0.25,2.3) 5(0.25,2.3) 6(0.75,2.3) 7(1.25,2.3) 8(1.75,2.3)
  rect 1.65x1.3 smd: M1(-4.025,0.4) M2(4.025,0.4)
Top Overlay:
  circle w0.25: c-2.45,2.5 r0.125
  lines w0.2: -4.225,-0.55 -4.225,-1 -4.925,-1 -4.925,-1.95 4.925,-1.95 4.925,-1 4.225,-1 4.225,-0.55 ; -4.225,1.35 -4.225,1.95 -2.225,1.95 ; 2.225,1.95 4.225,1.95 4.225,1.35
Top Designator:
  text ".Designator" at -7.498,-0.5 h1.5
Top Component Outline:
  lines w0.1: -1.85,1.9 -1.85,2.35 -1.65,2.35 -1.65,1.9 ; -1.35,1.9 -1.35,2.35 -1.15,2.35 -1.15,1.9 ; -0.85,1.9 -0.85,2.35 -0.65,2.35 -0.65,1.9 ; -0.35,1.9 -0.35,2.35 -0.15,2.35 -0.15,1.9 ; 0.15,1.9 0.15,2.35 0.35,2.35 0.35,1.9 ; 0.65,1.9 0.65,2.35 0.85,2.35 0.85,1.9 ; 1.15,1.9 1.15,2.35 1.35,2.35 1.35,1.9 ; 1.65,1.9 1.65,2.35 1.85,2.35 1.85,1.9 ; -4.85,-1.9 -4.85,-1 -4.15,-1 -4.15,1.9 4.15,1.9 4.15,-1 4.85,-1 4.85,-1.9 -4.85,-1.9
Top 3D Body:
  lines w0.1: -1.85,1.9 -1.85,2.35 -1.65,2.35 -1.65,1.9 ; -1.35,1.9 -1.35,2.35 -1.15,2.35 -1.15,1.9 ; -0.85,1.9 -0.85,2.35 -0.65,2.35 -0.65,1.9 ; -0.35,1.9 -0.35,2.35 -0.15,2.35 -0.15,1.9 ; 0.15,1.9 0.15,2.35 0.35,2.35 0.35,1.9 ; 0.65,1.9 0.65,2.35 0.85,2.35 0.85,1.9 ; 1.15,1.9 1.15,2.35 1.35,2.35 1.35,1.9 ; 1.65,1.9 1.65,2.35 1.85,2.35 1.85,1.9 ; -4.85,-1.9 4.85,-1.9 4.85,-1 4.15,-1 4.15,1.9 -4.15,1.9 -4.15,-1 -4.85,-1 -4.85,-1.9
Top Courtyard:
  lines w0.05: -0.5,0 0.5,0 ; 0,-0.5 0,0.5 ; -5.125,-2.15 -5.125,3 5.125,3 5.125,-2.15 -5.125,-2.15
3D body "687108183722.stp": height 1.28, standoff -0.01, extent -4.85,-1.9 4.85,2.35

## 687108188722 [mm] "0.5 mm LIF Horizontal FFC Connector, 8pins"
height 1.2
pads (10):
  rect 0.35x0.8 smd: 1(-1.75,2.05) 2(-1.25,2.05) 3(-0.75,2.05) 4(-0.25,2.05) 5(0.25,2.05) 6(0.75,2.05) 7(1.25,2.05) 8(1.75,2.05)
  rect 0.6x2.6 smd: M1(-2.65,-0.25) M2(2.65,-0.25)
Top Overlay:
  circle w0.25: c-2.45,2.25 r0.125
  lines w0.1: -3,-1.8 3,-1.8 ; -3,1.35 -3,1.8 -2.2,1.8 ; 2.2,1.8 3,1.8 3,1.35
Top Designator:
  text ".Designator" at -7.498,-0.5 h1.5
Top Component Outline:
  lines w0.1: -1.85,1.8 -1.85,2.3 -1.65,2.3 -1.65,1.8 ; -1.35,1.8 -1.35,2.3 -1.15,2.3 -1.15,1.8 ; -0.85,1.8 -0.85,2.3 -0.65,2.3 -0.65,1.8 ; -0.35,1.8 -0.35,2.3 -0.15,2.3 -0.15,1.8 ; 0.15,1.8 0.15,2.3 0.35,2.3 0.35,1.8 ; 0.65,1.8 0.65,2.3 0.85,2.3 0.85,1.8 ; 1.15,1.8 1.15,2.3 1.35,2.3 1.35,1.8 ; 1.65,1.8 1.65,2.3 1.85,2.3 1.85,1.8 ; -3,-1.8 -3,1.8 3,1.8 3,-1.8 -3,-1.8
Top 3D Body:
  lines w0.1: -1.85,1.8 -1.85,2.3 -1.65,2.3 -1.65,1.8 ; -1.35,1.8 -1.35,2.3 -1.15,2.3 -1.15,1.8 ; -0.85,1.8 -0.85,2.3 -0.65,2.3 -0.65,1.8 ; -0.35,1.8 -0.35,2.3 -0.15,2.3 -0.15,1.8 ; 0.15,1.8 0.15,2.3 0.35,2.3 0.35,1.8 ; 0.65,1.8 0.65,2.3 0.85,2.3 0.85,1.8 ; 1.15,1.8 1.15,2.3 1.35,2.3 1.35,1.8 ; 1.65,1.8 1.65,2.3 1.85,2.3 1.85,1.8 ; -3,-1.8 3,-1.8 3,1.8 -3,1.8 -3,-1.8
Top Courtyard:
  lines w0.05: -0.5,0 0.5,0 ; 0,-0.5 0,0.5 ; -3.2,-2 -3.2,2.65 3.2,2.65 3.2,-2 -3.2,-2
3D body "687108188722.stp": height 1.2, standoff 0, extent -3,-1.8 3,2.3

## 687110149022 [mm] "0.50mm SMT ZIF Horizontal Hinge Type Bottom Contact, 10p"
height 2.3
pads (12):
  rect 0.3x1.3 smd: 1(-2.25,3.35) 2(-1.75,3.35) 3(-1.25,3.35) 4(-0.75,3.35) 5(-0.25,3.35) 6(0.25,3.35) 7(0.75,3.35) 8(1.25,3.35) 9(1.75,3.35) 10(2.25,3.35)
  rect 2x1.8 smd: M1(-4.05,0.6) M2(4.05,0.6)
Top Overlay:
  circle w0.25: c-3.05,3.55 r0.125
  lines w0.2: -4.625,-0.625 -4.625,-2.975 4.625,-2.975 4.625,-0.625 ; -4.625,1.825 -4.625,2.975 -2.725,2.975 ; 2.725,2.975 4.625,2.975 4.625,1.825
Top Designator:
  text ".Designator" at -7.498,-0.5 h1.5
Top Component Outline:
  lines w0.1: -2.35,2.9 -2.35,3.6 -2.15,3.6 -2.15,2.9 ; -1.85,2.9 -1.85,3.6 -1.65,3.6 -1.65,2.9 ; -1.35,2.9 -1.35,3.6 -1.15,3.6 -1.15,2.9 ; -0.85,2.9 -0.85,3.6 -0.65,3.6 -0.65,2.9 ; -0.35,2.9 -0.35,3.6 -0.15,3.6 -0.15,2.9 ; 0.15,2.9 0.15,3.6 0.35,3.6 0.35,2.9 ; 0.65,2.9 0.65,3.6 0.85,3.6 0.85,2.9 ; 1.15,2.9 1.15,3.6 1.35,3.6 1.35,2.9 ; 1.65,2.9 1.65,3.6 1.85,3.6 1.85,2.9 ; 2.15,2.9 2.15,3.6 2.35,3.6 2.35,2.9 ; -4.55,-2.9 4.55,-2.9 4.55,2.9 -4.55,2.9 -4.55,-2.9
Top 3D Body:
  lines w0.1: -2.35,2.9 -2.35,3.6 -2.15,3.6 -2.15,2.9 ; -1.85,2.9 -1.85,3.6 -1.65,3.6 -1.65,2.9 ; -1.35,2.9 -1.35,3.6 -1.15,3.6 -1.15,2.9 ; -0.85,2.9 -0.85,3.6 -0.65,3.6 -0.65,2.9 ; -0.35,2.9 -0.35,3.6 -0.15,3.6 -0.15,2.9 ; 0.15,2.9 0.15,3.6 0.35,3.6 0.35,2.9 ; 0.65,2.9 0.65,3.6 0.85,3.6 0.85,2.9 ; 1.15,2.9 1.15,3.6 1.35,3.6 1.35,2.9 ; 1.65,2.9 1.65,3.6 1.85,3.6 1.85,2.9 ; 2.15,2.9 2.15,3.6 2.35,3.6 2.35,2.9 ; -4.55,-2.9 -4.55,2.9 4.55,2.9 4.55,-2.9 -4.55,-2.9
Top Courtyard:
  lines w0.05: -0.5,0 0.5,0 ; 0,-0.5 0,0.5 ; -5.25,-3.175 5.25,-3.175 5.25,4.2 -5.25,4.2 -5.25,-3.175
3D body "687110149022.stp": height 2.25, standoff 0, extent -4.55,-2.9 4.55,3.6